# Altium schematic symbol library DRV8876PWPR.SchLib: 1 symbol
Pins are listed as number, name and electrical type; pins without a type are passive.

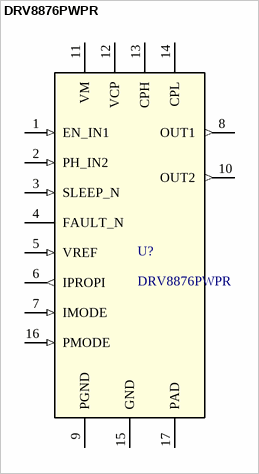
[diagram p0: symbol DRV8876PWPR]

## DRV8876PWPR
designator U?
40-V, 3.5-A H-bridge motor driver with integrated current sensing &amp; current-sense feedback 16-HTSSOP -40 to 125; Manufacturer_Name: Texas Instruments; TYPE: TYPE; RefDes: RefDes; Copyright: Copyright (C) 2026 Ultra Librarian. All rights reserved.; Manufacturer_Part_Number: DRV8876PWPR
footprint PWP0016J_N
pins: 1 EN_IN1 (in), 2 PH_IN2 (in), 3 SLEEP_N (in), 4 FAULT_N (oc), 5 VREF (in), 6 IPROPI (out), 7 IMODE (in), 8 OUT1 (out), 9 PGND (power), 10 OUT2 (out), 11 VM (power), 12 VCP (power), 13 CPH, 14 CPL, 15 GND (power), 16 PMODE (in), 17 PAD (power)